# Altium footprint library standard-case.PcbLib: 285 footprints (part 6 of 18)
Each footprint in its own frame and in the unit in brackets; x right, y up, seen from the top. Pads: shape width x height; smd on the part's side, far side on the other; paste and mask are expansions set on the pad; w line width, h text height; cw(c..) or ccw(c..) is an arc to the next point about the centre after c.
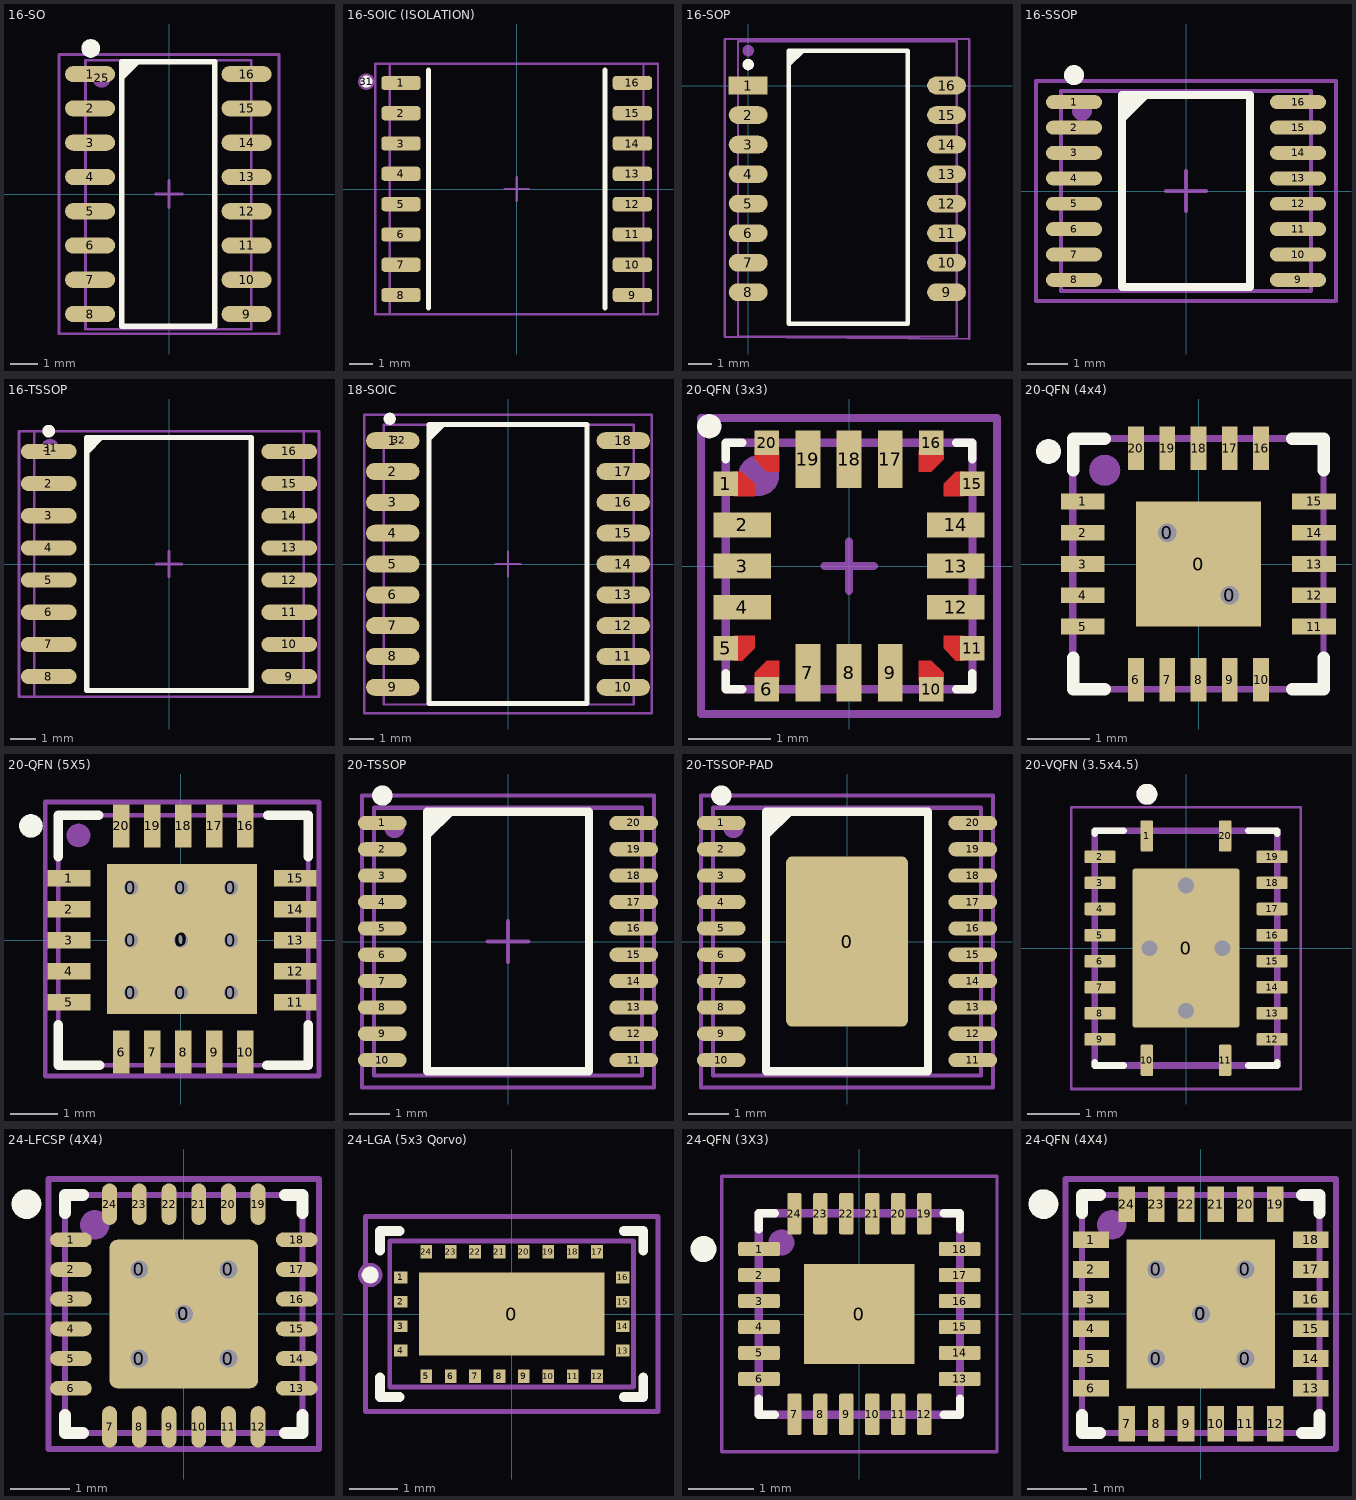
[diagram p5: the footprints below, top view; thin cyan lines are the x and y axes]

## 16-SO [mm] "pitch 1.27 mm"
height 2.65
pads (18):
  oval 1.85x0.6 smd: 1(-2.925,4.448) 2(-2.925,3.178) 3(-2.925,1.908) 4(-2.925,0.638) 5(-2.925,-0.632) 6(-2.925,-1.902) 7(-2.925,-3.172) 8(-2.925,-4.442) 9(2.875,-4.442) 10(2.875,-3.172) 11(2.875,-1.902) 12(2.875,-0.632) 13(2.875,0.638) 14(2.875,1.908) 15(2.875,3.178) 16(2.875,4.448)
  round 0.7 on Mech1: 25(-2.5,4.3)
  round 0.7 on Top Overlay: ""(-2.9,5.4)
Top Overlay:
  region: -1.75,4.9 -1.75,4.18 -1.03,4.9
  lines w0.2: -1.75,-4.9 -1.75,4.9 1.7,4.9 1.7,-4.9 -1.75,-4.9
Mechanical 1:
  lines w0.1: -3.093,-5.01 -3.093,4.96 3.044,4.96 3.044,-5.01 -3.093,-5.01
Mechanical 15:
  lines w0.1: -0.499,0.003 0.501,0.003 ; 0.001,-0.497 0.001,0.503 ; -4.075,-5.175 -4.075,5.175 4.075,5.175 4.075,-5.175 -4.075,-5.175
3D body "User Library-so16-1.STEP": height 1.73, standoff -0.04, extent -3.093,-5.01 3.044,4.96

## 16-SOIC (ISOLATION) [mm] "pitch 1.27 mm"
height 2.65
pads (17):
  rrect50% 1.65x0.6 smd: 1(-4.85,4.445) 2(-4.85,3.175) 3(-4.85,1.905) 4(-4.85,0.635) 5(-4.85,-0.635) 6(-4.85,-1.905) 7(-4.85,-3.175) 8(-4.85,-4.445) 9(4.85,-4.445) 10(4.85,-3.175) 11(4.85,-1.905) 12(4.85,-0.635) 13(4.85,0.635) 14(4.85,1.905) 15(4.85,3.175) 16(4.85,4.445)
  round 0.7 on Mech1: 31(-6.3,4.5)
Top Overlay:
  circle w0.25: c-6.3,4.5 r0.125
  lines w0.2: -3.7,-5 -3.7,5 ; 3.7,-5 3.7,5
Mechanical 1:
  lines w0.1: -5.315,-5.25 -5.315,5.25 5.315,5.25 5.315,-5.25 -5.315,-5.25
Mechanical 15:
  lines w0.1: -0.5,0 0.5,0 ; 0,-0.5 0,0.5 ; -5.925,-5.25 -5.925,5.25 5.925,5.25 5.925,-5.25 -5.925,-5.25
3D body "User Library-SOIC16_Wide_JEDEC_MS-013AA.STEP": height 2.62, standoff -0.03, extent -5.315,-5.25 5.315,5.25

## 16-SOP [mm] "pitch 1.27 mm"
pads (18):
  rect 1.67x0.76 smd: 1(0,0)
  oval 1.67x0.76 smd: 2(0,-1.27) 3(0,-2.54) 4(0,-3.81) 5(0,-5.08) 6(0,-6.35) 7(0,-7.62) 8(0,-8.89) 9(8.53,-8.89) 10(8.53,-7.62) 11(8.53,-6.35) 12(8.53,-5.08) 13(8.53,-3.81) 14(8.53,-2.54) 15(8.53,-1.27) 16(8.53,0)
  round 0.5 on Top Overlay: ""(0,0.9)
  round 0.5 on Mech1: ""(0,1.5)
Top Overlay:
  region: 1.75,1.5 1.75,0.78 2.47,1.5
  lines w0.2: 4.583,1.5 6.86,1.5 6.86,-10.25 1.75,-10.25 1.75,1.5 6,1.5
Mechanical 1:
  lines w0.1: -0.435,-10.795 8.965,-10.795 8.965,1.905 -0.435,1.905 -0.435,-10.795
Mechanical 15:
  lines w0.1: -1,-10.8 9.5,-10.9 9.5,2 -1,2 -1,-10.8
3D body "User Library-smt4.step": height 5.1, standoff 0, extent -0.435,-10.795 8.965,1.905

## 16-SSOP [mm] "pitch 0.635 mm"
height 1.75
pads (17):
  oval 1.4x0.35 smd: 1(-2.8,2.222) 2(-2.8,1.587) 3(-2.8,0.953) 4(-2.8,0.318) 5(-2.8,-0.318) 6(-2.8,-0.953) 7(-2.8,-1.587) 8(-2.8,-2.222) 9(2.8,-2.222) 10(2.8,-1.587) 11(2.8,-0.953) 12(2.8,-0.318) 13(2.8,0.318) 14(2.8,0.953) 15(2.8,1.587) 16(2.8,2.222)
  round 0.5 on Mech1: ""(-2.6,2)
Top Overlay:
  circle w0.25: c-2.8,2.9 r0.125
  region: -1.6,2.4 -1.6,1.68 -0.88,2.4
  lines w0.2: -1.6,-2.4 -1.6,2.4 1.6,2.4 1.6,-2.4 -1.6,-2.4
Mechanical 1:
  lines w0.1: -3.127,-2.5 -3.127,2.5 3.126,2.5 3.126,-2.5 -3.127,-2.5
Mechanical 15:
  lines w0.1: -0.5,0 0.5,0 ; 0,-0.5 0,0.5 ; -3.75,-2.75 -3.75,2.75 3.75,2.75 3.75,-2.75 -3.75,-2.75
3D body "ssop16.step": height 1.73, standoff -0.01, extent -3.127,-2.5 3.126,2.5

## 16-TSSOP [mm] "pitch 1.27 mm"
height 2.65
pads (17):
  oval 2.2x0.6 smd: 1(-4.75,4.445) 2(-4.75,3.175) 3(-4.75,1.905) 4(-4.75,0.635) 5(-4.75,-0.635) 6(-4.75,-1.905) 7(-4.75,-3.175) 8(-4.75,-4.445) 9(4.75,-4.445) 10(4.75,-3.175) 11(4.75,-1.905) 12(4.75,-0.635) 13(4.75,0.635) 14(4.75,1.905) 15(4.75,3.175) 16(4.75,4.445)
  round 0.7 on Mech1: 31(-4.7,4.6)
Top Overlay:
  circle w0.25: c-4.75,5.25 r0.125
  region: -3.25,5 -3.25,4.28 -2.53,5
  lines w0.2: -3.25,-5 -3.25,5 3.25,5 3.25,-5 -3.25,-5
Mechanical 1:
  lines w0.1: -5.315,-5.25 5.315,-5.25 5.315,5.25 -5.315,5.25 -5.315,-5.25
Mechanical 15:
  lines w0.1: -0.5,0 0.5,0 ; 0,-0.5 0,0.5 ; -5.925,-5.25 5.925,-5.25 5.925,5.25 -5.925,5.25 -5.925,-5.25
3D body "User Library-SOIC16_Wide_JEDEC_MS-013AA.STEP": height 2.62, standoff -0.03, extent -5.315,-5.25 5.315,5.25

## 18-SOIC [mm] "pitch 1.27 mm"
height 2.65
pads (19):
  oval 2.2x0.7 smd: 1(-4.75,5.08) 2(-4.75,3.81) 3(-4.75,2.54) 4(-4.75,1.27) 5(-4.75,0) 6(-4.75,-1.27) 7(-4.75,-2.54) 8(-4.75,-3.81) 9(-4.75,-5.08) 10(4.75,-5.08) 11(4.75,-3.81) 12(4.75,-2.54) 13(4.75,-1.27) 14(4.75,0) 15(4.75,1.27) 16(4.75,2.54) 17(4.75,3.81) 18(4.75,5.08)
  round 0.7 on Mech1: 32(-4.5,5.1)
Top Overlay:
  region: -3.25,5.75 -3.25,5.03 -2.53,5.75
  lines w0.2: -3.25,-5.75 -3.25,5.75 3.25,5.75 3.25,-5.75 -3.25,-5.75
  lines w0.25: -4.75,6 ccw(c-4.874,5.983) -4.749,5.983
Mechanical 1:
  lines w0.1: -5.125,-5.79 -5.125,5.74 5.175,5.74 5.175,-5.79 -5.125,-5.79
Mechanical 15:
  lines w0.1: -0.5,0 0.5,0 ; 0,-0.5 0,0.5 ; -5.925,-6.15 -5.925,6.15 5.925,6.15 5.925,-6.15 -5.925,-6.15
3D body "SW3dPS-SOIC18-300.STEP": height 2.65, standoff 0, extent -5.125,-5.79 5.175,5.74

## 20-QFN (3x3) [mm] "3x3 mm, pitch 0.5 mm"
pads (22):
  rect 0.3x0.3 smd: 1(-1.5,1) 5(-1.5,-1) 6(-1,-1.5) 10(1,-1.5) 11(1.5,-1) 15(1.5,1) 16(1,1.5) 20(-1,1.5)
  rect 0.7x0.3 smd: 2(-1.3,0.5) 3(-1.3,0) 4(-1.3,-0.5) 12(1.3,-0.5) 13(1.3,0) 14(1.3,0.5)
  rect 0.3x0.7 smd: 7(-0.5,-1.3) 8(0,-1.3) 9(0.5,-1.3) 17(0.5,1.3) 18(0,1.3) 19(-0.5,1.3)
  round 0.3 on Top Overlay: ""(-1.7,1.7)
  round 0.5 on Mech1: ""(-1.1,1.1)
Top Layer:
  region: 1.4,-1.15 1.3,-1.15 1.15,-1 1.15,-0.85 1.4,-0.85
  region: 1.15,-1.4 1.15,-1.3 1,-1.15 0.85,-1.15 0.85,-1.4
  region: -1.15,-1.4 -1.15,-1.3 -1,-1.15 -0.85,-1.15 -0.85,-1.4
  region: -1.4,-1.15 -1.3,-1.15 -1.15,-1 -1.15,-0.85 -1.4,-0.85
  region: 1.15,1.4 1.15,1.3 1,1.15 0.85,1.15 0.85,1.4
  region: 1.4,1.15 1.3,1.15 1.15,1 1.15,0.85 1.4,0.85
  region: -1.15,1.4 -1.15,1.3 -1,1.15 -0.85,1.15 -0.85,1.4
  region: -1.4,1.15 -1.3,1.15 -1.15,1 -1.15,0.85 -1.4,0.85
Top Overlay:
  lines w0.1: -1.5,-1.3 -1.5,-1.5 -1.3,-1.5 ; -1.5,1.3 -1.5,1.5 -1.3,1.5 ; 1.3,-1.5 1.5,-1.5 1.5,-1.3 ; 1.3,1.5 1.5,1.5 1.5,1.3
Top Solder:
  region: 0.75,0.85 0.85,0.85 0.85,0.75 1.25,0.75 1.25,1.25 0.75,1.25
  region: -0.75,0.85 -0.85,0.85 -0.85,0.75 -1.25,0.75 -1.25,1.25 -0.75,1.25
  region: -0.75,-0.85 -0.85,-0.85 -0.85,-0.75 -1.25,-0.75 -1.25,-1.25 -0.75,-1.25
  region: 0.75,-0.85 0.85,-0.85 0.85,-0.75 1.25,-0.75 1.25,-1.25 0.75,-1.25
Mechanical 1:
  lines w0.1: -1.5,-1.5 1.5,-1.5 1.5,1.5 -1.5,1.5 -1.5,-1.5
Mechanical 15:
  lines w0.1: -0.3,0 0.3,0 ; 0,-0.3 0,0.3 ; -1.8,-1.8 1.8,-1.8 1.8,1.8 -1.8,1.8 -1.8,-1.8
3D body "User Library-UFQFPN20-1.STEP": height 0.55, standoff 0, extent -1.5,-1.5 1.5,1.5

## 20-QFN (4x4) [mm] "4x4 mm, pitch 0.5 mm, power pad"
height 0.75
pads (25):
  round 0.7 hole 0.3: 0(-0.5,0.5) 0(0.5,-0.5)
  rect 2x2 smd: 0(0,0)
  rect 0.7x0.25 smd: 1(-1.85,1) 2(-1.85,0.5) 3(-1.85,0) 4(-1.85,-0.5) 5(-1.85,-1) 11(1.85,-1) 12(1.85,-0.5) 13(1.85,0) 14(1.85,0.5) 15(1.85,1)
  rect 0.25x0.7 smd: 6(-1,-1.85) 7(-0.5,-1.85) 8(0,-1.85) 9(0.5,-1.85) 10(1,-1.85) 16(1,1.85) 17(0.5,1.85) 18(0,1.85) 19(-0.5,1.85) 20(-1,1.85)
  round 0.4 on Top Overlay: ""(-2.4,1.8)
  round 0.5 on Mech1: ""(-1.5,1.5)
Top Overlay:
  lines w0.2: -2,-1.5 -2,-2 -1.5,-2 ; -2,1.5 -2,2 -1.5,2 ; 1.5,-2 2,-2 2,-1.5 ; 1.5,2 2,2 2,1.5
Mechanical 1:
  lines w0.1: -2.02,-2.01 2,-2.01 2,2.01 -2.02,2.01 -2.02,-2.01
Mechanical 15:
  lines w0.1: -0.2,0 0.2,0 ; 0,-0.2 0,0.2 ; -2,-2 2,-2 2,2 -2,2 -2,-2
3D body "User Library-QFN20_4x4x0_8.STEP": height 0.78, standoff -0.02, extent -2.02,-2.01 2,2.01

## 20-QFN (5X5) [mm] "5x5 mm, pitch 0.65 mm, power pad"
pads (32):
  round 0.7 hole 0.3: 0(-1.05,-1.1) 0(-1.05,0) 0(-1.05,1.1) 0(0,-1.1) 0(0,0) 0(0,1.1) 0(1.05,-1.1) 0(1.05,0) 0(1.05,1.1)
  rect 3.15x3.15 smd: 0(0.025,0.025)
  rect 0.9x0.35 smd: 1(-2.35,1.3) 2(-2.35,0.65) 3(-2.35,0) 4(-2.35,-0.65) 5(-2.35,-1.3) 11(2.4,-1.3) 12(2.4,-0.65) 13(2.4,0) 14(2.4,0.65) 15(2.4,1.3)
  rect 0.35x0.9 smd: 6(-1.25,-2.35) 7(-0.6,-2.35) 8(0.05,-2.35) 9(0.7,-2.35) 10(1.35,-2.35) 16(1.35,2.4) 17(0.7,2.4) 18(0.05,2.4) 19(-0.6,2.4) 20(-1.25,2.4)
  round 0.5 on Top Overlay: ""(-3.15,2.4)
  round 0.5 on Mech1: ""(-2.15,2.2)
Top Overlay:
  lines w0.2: -2.575,-1.775 -2.575,-2.625 -1.7,-2.625 ; -2.575,1.75 -2.575,2.625 -1.725,2.625 ; 1.8,-2.625 2.675,-2.625 2.675,-1.775 ; 1.825,2.625 2.675,2.625 2.675,1.75
Mechanical 1:
  lines w0.1: -2.575,-2.625 2.675,-2.625 2.675,2.625 -2.575,2.625 -2.575,-2.625
Mechanical 15:
  lines w0.1: -2.85,-2.85 2.9,-2.85 2.9,2.9 -2.85,2.9 -2.85,-2.85
3D body "User Library-VQFN-20-1.STEP": height 1, standoff -0.05, extent -2.575,-2.625 2.675,2.625

## 20-TSSOP [mm] "pitch 0.65 mm"
height 1.2
pads (21):
  oval 1.2x0.35 smd: 1(-3.1,2.925) 2(-3.1,2.275) 3(-3.1,1.625) 4(-3.1,0.975) 5(-3.1,0.325) 6(-3.1,-0.325) 7(-3.1,-0.975) 8(-3.1,-1.625) 9(-3.1,-2.275) 10(-3.1,-2.925) 11(3.1,-2.925) 12(3.1,-2.275) 13(3.1,-1.625) 14(3.1,-0.975) 15(3.1,-0.325) 16(3.1,0.325) 17(3.1,0.975) 18(3.1,1.625) 19(3.1,2.275) 20(3.1,2.925)
  round 0.5 on Mech1: ""(-2.8,2.8)
Top Overlay:
  circle w0.25: c-3.1,3.6 r0.125
  region: -2,3.2 -2,2.48 -1.28,3.2
  lines w0.2: -2,-3.2 -2,3.2 2,3.2 2,-3.2 -2,-3.2
Mechanical 1:
  lines w0.1: -3.3,-3.3 3.3,-3.3 3.3,3.3 -3.3,3.3 -3.3,-3.3
Mechanical 15:
  lines w0.1: -0.5,0 0.5,0 ; 0,-0.5 0,0.5 ; -3.6,-3.6 3.6,-3.6 3.6,3.6 -3.6,3.6 -3.6,-3.6
3D body "TSSOP-20.STEP": height 1.2, standoff 0, extent -3.3,-3.3 3.3,3.3

## 20-TSSOP-PAD [mm] "pitch 0.65 mm, power pad"
height 1.2
pads (22):
  rrect10% 3x4.2 smd: 0(0,0)
  oval 1.2x0.35 smd: 1(-3.1,2.925) 2(-3.1,2.275) 3(-3.1,1.625) 4(-3.1,0.975) 5(-3.1,0.325) 6(-3.1,-0.325) 7(-3.1,-0.975) 8(-3.1,-1.625) 9(-3.1,-2.275) 10(-3.1,-2.925) 11(3.1,-2.925) 12(3.1,-2.275) 13(3.1,-1.625) 14(3.1,-0.975) 15(3.1,-0.325) 16(3.1,0.325) 17(3.1,0.975) 18(3.1,1.625) 19(3.1,2.275) 20(3.1,2.925)
  round 0.5 on Mech1: ""(-2.8,2.8)
Top Overlay:
  circle w0.25: c-3.1,3.6 r0.125
  region: -2,3.2 -2,2.48 -1.28,3.2
  lines w0.2: -2,-3.2 2,-3.2 2,3.2 -2,3.2 -2,-3.2
Mechanical 1:
  lines w0.1: -3.3,-3.3 3.3,-3.3 3.3,3.3 -3.3,3.3 -3.3,-3.3
Mechanical 15:
  lines w0.1: -0.5,0 0.5,0 ; 0,-0.5 0,0.5 ; -3.6,-3.6 3.6,-3.6 3.6,3.6 -3.6,3.6 -3.6,-3.6
3D body "TSSOP-20.STEP": height 1.2, standoff 0, extent -3.3,-3.3 3.3,3.3

## 20-VQFN (3.5x4.5) [mm] "3.5x4.5 mm, pitch 0.5 mm"
pads (21):
  rrect5% 2.05x3.05 smd paste-3 mask+0: 0(0,0)
  rrect25% 0.24x0.6 smd mask+0: 1(-0.75,2.15) 10(-0.75,-2.15) 11(0.75,-2.15) 20(0.75,2.15)
  rrect25% 0.6x0.24 smd mask+0: 2(-1.65,1.75) 3(-1.65,1.25) 4(-1.65,0.75) 5(-1.65,0.25) 6(-1.65,-0.25) 7(-1.65,-0.75) 8(-1.65,-1.25) 9(-1.65,-1.75) 12(1.65,-1.75) 13(1.65,-1.25) 14(1.65,-0.75) 15(1.65,-0.25) 16(1.65,0.25) 17(1.65,0.75) 18(1.65,1.25) 19(1.65,1.75)
via 0,1.2 diameter 0.5 hole 0.3
via 0,-1.2 diameter 0.5 hole 0.3
via -0.7,0 diameter 0.5 hole 0.3
via 0.7,0 diameter 0.5 hole 0.3
Top Overlay:
  circle w0.2: c-0.75,2.95 r0.1
  lines w0.127: -1.75,-2.19 -1.75,-2.25 -1.19,-2.25 ; -1.75,2.19 -1.75,2.25 -1.19,2.25 ; 1.19,-2.25 1.75,-2.25 1.75,-2.19 ; 1.19,2.25 1.75,2.25 1.75,2.19
Top Paste:
  drawing of 4 lines, arcs and shapes, not listed
Top Solder:
  drawing of 21 lines, arcs and shapes, not listed
Mechanical 13:
  circle w0.2: c-0.75,2.95 r0.1
  lines w0.127: -1.75,-2.25 -1.75,2.25 1.75,2.25 1.75,-2.25 -1.75,-2.25
Mechanical 15:
  lines w0.05: -2.2,-2.7 2.2,-2.7 2.2,2.7 -2.2,2.7 -2.2,-2.7
3D body "step_temp.STEP": height 1, standoff 0, extent -1.75,-2.25 1.75,2.25

## 24-LFCSP (4X4) [mm] "4x4 mm, pitch 0.5 mm, power pad"
height 0.75
pads (31):
  round 0.7 hole 0.3: 0(-0.75,-0.75) 0(-0.75,0.75) 0(0,0) 0(0.75,-0.75) 0(0.75,0.75)
  rrect10% 2.5x2.5 smd: 0(0,0)
  rrect100% 0.7x0.25 smd: 1(-1.9,1.25) 2(-1.9,0.75) 3(-1.9,0.25) 4(-1.9,-0.25) 5(-1.9,-0.75) 6(-1.9,-1.25) 13(1.9,-1.25) 14(1.9,-0.75) 15(1.9,-0.25) 16(1.9,0.25) 17(1.9,0.75) 18(1.9,1.25)
  rrect100% 0.25x0.7 smd: 7(-1.25,-1.9) 8(-0.75,-1.9) 9(-0.25,-1.9) 10(0.25,-1.9) 11(0.75,-1.9) 12(1.25,-1.9) 19(1.25,1.85) 20(0.75,1.85) 21(0.25,1.85) 22(-0.25,1.85) 23(-0.75,1.85) 24(-1.25,1.85)
  round 0.5 on Mech1: ""(-1.5,1.5)
Top Overlay:
  circle w0.25: c-2.65,1.85 r0.125
  lines w0.2: -2,-1.7 -2,-2 -1.7,-2 ; -2,1.7 -2,2 -1.7,2 ; 1.7,-2 2,-2 2,-1.7 ; 1.7,2 2,2 2,1.7
Mechanical 1:
  lines w0.1: -2,-2 2,-2 2,2 -2,2 -2,-2
Mechanical 15:
  lines w0.1: -0.5,0 0.5,0 ; 0,-0.5 0,0.5 ; -2.275,-2.275 2.275,-2.275 2.275,2.275 -2.275,2.275 -2.275,-2.275
3D body "24-QFN (4x4 mm).step": height 0.75, standoff 0, extent -2,-2 2,2

## 24-LGA (5x3 Qorvo) [mm] "5x3 mm, pitch 0.5 mm"
height 0.75
pads (27):
  rect 3.8x1.7 smd paste-2539.97 mask+0.05: 0(0,0)
  rect 0.275x0.24 smd mask+0.05: 1(-2.275,0.75) 2(-2.275,0.25) 3(-2.275,-0.25) 4(-2.275,-0.75) 13(2.275,-0.75) 14(2.275,-0.25) 15(2.275,0.25) 16(2.275,0.75)
  rect 0.24x0.275 smd mask+0.05: 5(-1.75,-1.275) 6(-1.25,-1.275) 7(-0.75,-1.275) 8(-0.25,-1.275) 9(0.25,-1.275) 10(0.75,-1.275) 11(1.25,-1.275) 12(1.75,-1.275) 17(1.75,1.275) 18(1.25,1.275) 19(0.75,1.275) 20(0.25,1.275) 21(-0.25,1.275) 22(-0.75,1.275) 23(-1.25,1.275) 24(-1.75,1.275)
  round 0.35 on Top Overlay: ""(-2.9,0.8)
  round 0.5 on Mech1: ""(-2.9,0.8)
Top Overlay:
  lines w0.2: -2.7,-1.3 -2.7,-1.7 -2.3,-1.7 ; -2.7,1.3 -2.7,1.7 -2.3,1.7 ; 2.3,-1.7 2.7,-1.7 2.7,-1.3 ; 2.3,1.7 2.7,1.7 2.7,1.3
Top Paste:
  region: -1.1,-0.8 -1.1,-0.1 -1.8,-0.1 -1.8,-0.8
  region: -0.15,-0.8 -0.15,-0.1 -0.85,-0.1 -0.85,-0.8
  region: 1.1,-0.8 1.1,-0.1 1.8,-0.1 1.8,-0.8
  region: 0.15,-0.8 0.15,-0.1 0.85,-0.1 0.85,-0.8
  region: -1.1,0.8 -1.1,0.1 -1.8,0.1 -1.8,0.8
  region: -0.15,0.8 -0.15,0.1 -0.85,0.1 -0.85,0.8
  region: 1.1,0.8 1.1,0.1 1.8,0.1 1.8,0.8
  region: 0.15,0.8 0.15,0.1 0.85,0.1 0.85,0.8
Mechanical 1:
  lines w0.1: -2.5,-1.5 2.5,-1.5 2.5,1.5 -2.5,1.5 -2.5,-1.5
Mechanical 15:
  lines w0.1: -0.2,0 0.2,0 ; 0,-0.2 0,0.2 ; -3,-2 -3,2 3,2 3,-2 -3,-2
3D body "Qorvo_5x3(QPF4288A).STEP": height 0.8, standoff 0, extent -2.5,-1.5 2.5,1.5

## 24-QFN (3X3) [mm] "3x3 mm, pitch 0.4 mm, power pad"
height 0.75
pads (25):
  rect 1.7x1.54 smd: 0(0,0)
  rrect25% 0.64x0.22 smd: 1(-1.545,1) 2(-1.545,0.6) 3(-1.545,0.2) 4(-1.545,-0.2) 5(-1.545,-0.6) 6(-1.545,-1) 13(1.545,-1) 14(1.545,-0.6) 15(1.545,-0.2) 16(1.545,0.2) 17(1.545,0.6) 18(1.545,1)
  rrect25% 0.22x0.64 smd: 7(-1,-1.545) 8(-0.6,-1.545) 9(-0.2,-1.545) 10(0.2,-1.545) 11(0.6,-1.545) 12(1,-1.545) 19(1,1.545) 20(0.6,1.545) 21(0.2,1.545) 22(-0.2,1.545) 23(-0.6,1.545) 24(-1,1.545)
Top Overlay:
  circle w0.2: c-2.4,1 r0.1
  lines w0.127: -1.55,-1.3 -1.55,-1.55 -1.3,-1.55 ; -1.55,1.3 -1.55,1.55 -1.3,1.55 ; 1.3,-1.55 1.55,-1.55 1.55,-1.3 ; 1.3,1.55 1.55,1.55 1.55,1.3
Mechanical 13:
  circle w0.2: c-1.2,1.1 r0.1
  lines w0.127: -1.55,-1.55 1.55,-1.55 1.55,1.55 -1.55,1.55 -1.55,-1.55
Mechanical 15:
  lines w0.05: -2.12,-2.12 2.12,-2.12 2.12,2.12 -2.12,2.12 -2.12,-2.12
3D body "QFN-24 3x3 0.4mm.stp": height 1.04, standoff -0.01, extent -1.501,-1.501 1.501,1.501

## 24-QFN (4X4) [mm] "4x4 mm, pitch 0.5 mm, power pad"
height 0.75
pads (31):
  round 0.7 hole 0.3: 0(-0.75,-0.75) 0(-0.75,0.75) 0(0,0) 0(0.75,-0.75) 0(0.75,0.75)
  rect 2.5x2.5 smd: 0(0,0)
  rect 0.6x0.28 smd: 1(-1.85,1.25) 2(-1.85,0.75) 3(-1.85,0.25) 4(-1.85,-0.25) 5(-1.85,-0.75) 6(-1.85,-1.25) 13(1.85,-1.25) 14(1.85,-0.75) 15(1.85,-0.25) 16(1.85,0.25) 17(1.85,0.75) 18(1.85,1.25)
  rect 0.28x0.6 smd: 7(-1.25,-1.85) 8(-0.75,-1.85) 9(-0.25,-1.85) 10(0.25,-1.85) 11(0.75,-1.85) 12(1.25,-1.85) 19(1.25,1.85) 20(0.75,1.85) 21(0.25,1.85) 22(-0.25,1.85) 23(-0.75,1.85) 24(-1.25,1.85)
  round 0.5 on Mech1: ""(-1.5,1.5)
Top Overlay:
  circle w0.25: c-2.65,1.85 r0.125
  lines w0.2: -2,-1.7 -2,-2 -1.7,-2 ; -2,1.7 -2,2 -1.7,2 ; 1.7,-2 2,-2 2,-1.7 ; 1.7,2 2,2 2,1.7
Mechanical 1:
  lines w0.1: -2,-2 2,-2 2,2 -2,2 -2,-2
Mechanical 15:
  lines w0.1: -0.5,0 0.5,0 ; 0,-0.5 0,0.5 ; -2.275,-2.275 2.275,-2.275 2.275,2.275 -2.275,2.275 -2.275,-2.275
3D body "24-QFN (4x4 mm).step": height 0.75, standoff 0, extent -2,-2 2,2